# Altium integrated library AO3400A.IntLib: 1 symbol
Pins are listed as number, name and electrical type; pins without a type are passive.

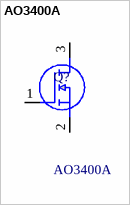
[diagram p0: symbol AO3400A]

## AO3400A
designator Q?
30V N-Channel MOSFET; Manufacturer_Name: Alpha & Omega Semiconductors; Geometry.Height: 1.25mm; Manufacturer_Part_Number: AO3400A; Mouser Part Number: *; Mouser Price/Stock: *; Arrow Part Number: AO3400A; Arrow Price/Stock: https://www.arrow.com/en/products/ao3400a/alpha-and-omega-semiconductor?utm_currency=USD&region=nac; Datasheet Link: http://aosmd.com/res/data_sheets/AO3400A.pdf
footprint SOT95P280X125-3N
pins: 1 G, 2 S, 3 D